# Altium integrated library HSD-1206W03.IntLib: 1 symbol
Pins are listed as number, name and electrical type; pins without a type are passive.

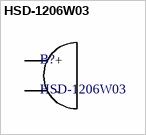
[diagram p0: symbol HSD-1206W03]

## HSD-1206W03
designator B?
BUZZER MAGNETIC 3V 12MM TH
footprint HSD-1206W03
pins: 1 +, 2 -